# Altium integrated library ERJP06J102V.IntLib: 1 symbol
Pins are listed as number, name and electrical type; pins without a type are passive.

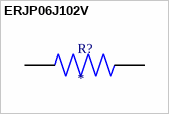
[diagram p0: symbol ERJP06J102V]

## ERJP06J102V
designator R?
1 kOhms Â±5% 0.5W, 1/2W Chip Resistor 0805 (2012 Metric) Automotive AEC-Q200, Pulse Withstanding Thick Film; MP: ERJ-P06J102V; MF: Panasonic Electronic; SnapEDA_Link: https://www.snapeda.com/parts/ERJ-P06J102V/Panasonic+Electronic+Components/view-part/?ref=snap; Availability: In Stock; Package: 2012-2 Panasonic; Check_prices: https://www.snapeda.com/parts/ERJ-P06J102V/Panasonic+Electronic+Components/view-part/?ref=eda; Value: *; Purchase-URL: https://pricing.snapeda.com/search/part/ERJ-P06J102V/?ref=eda; Price: None
footprint RES_ERJP06J102V
pins: 1, 2